# Altium footprint library HSD-1206W03.PcbLib: 1 footprints
Each footprint in its own frame and in the unit in brackets; x right, y up, seen from the top. Pads: shape width x height; smd on the part's side, far side on the other; paste and mask are expansions set on the pad; w line width, h text height; cw(c..) or ccw(c..) is an arc to the next point about the centre after c.
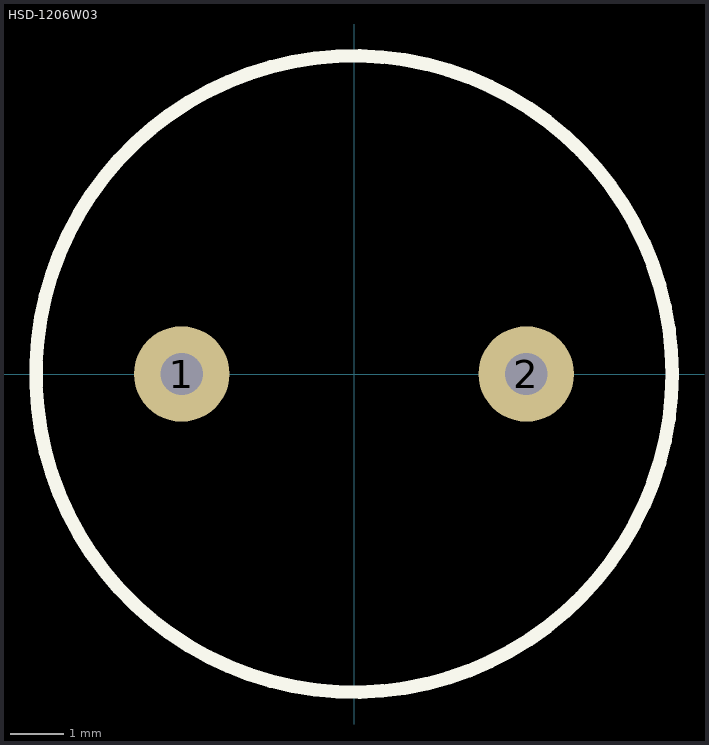
[diagram p0: the footprint, top view; thin cyan lines are the x and y axes]

## HSD-1206W03 [mm]
pads (2):
  round 1.8 hole 0.8: 1(-3.25,0) 2(3.25,0)
Top Overlay:
  circle w0.254: c0,0 r6
Mechanical 1:
  circle w0.05: c0,0 r6
3D body "WT-1205.step": height 9.5, standoff -3.8, extent -6,-5.998 6.01,5.998